# Altium schematic symbol library capstone.SchLib: 11 symbols
Pins are listed as number, name and electrical type; pins without a type are passive.

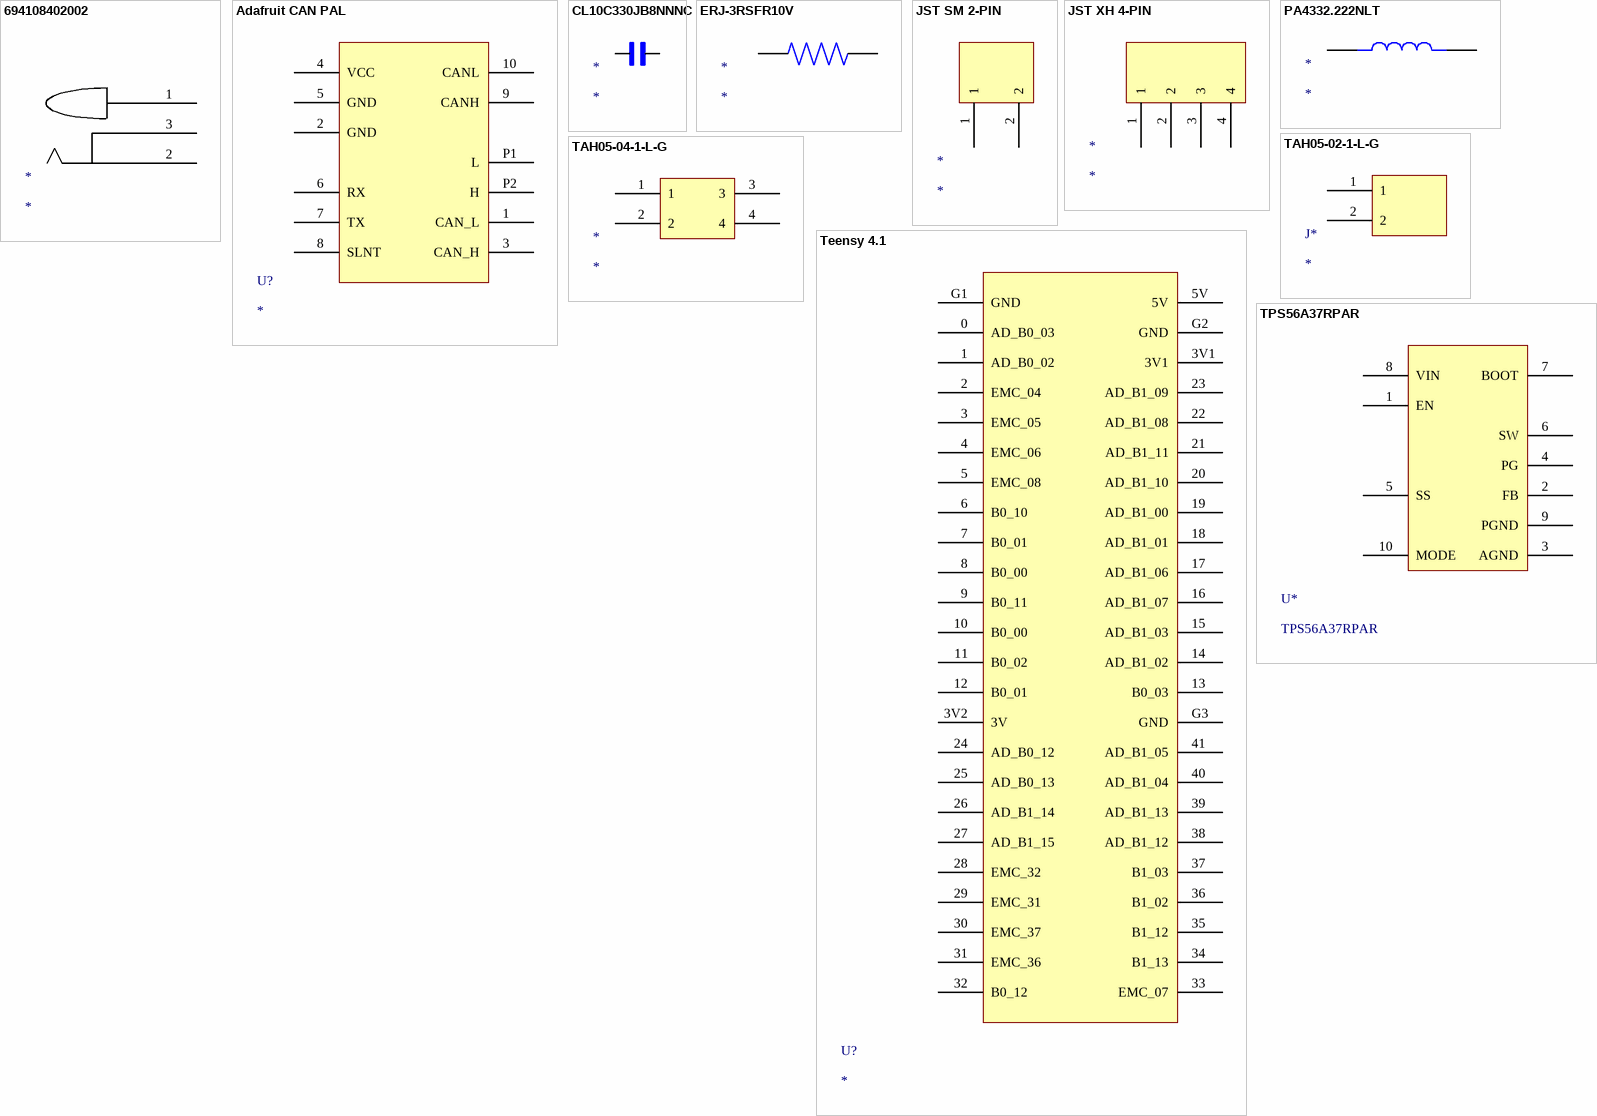
[diagram p0: symbols 694108402002 to TPS56A37RPAR]

## 694108402002
designator *
footprint 694108402002
pins: 1, 2, 3

## Adafruit CAN PAL
designator U?
CAN transciever
footprint ADAFRUIT CAN PAL
pins: 1 CAN_L, 2 GND, 3 CAN_H, 4 VCC, 5 GND, 6 RX, 7 TX, 8 SLNT, 9 CANH, 10 CANL, P1 L, P2 H

## CL10C330JB8NNNC
designator *
footprint CL10C330JB8NNNC
pins: 1, 2

## ERJ-3RSFR10V
designator *
footprint ERJ-3RSFR10V
pins: 1, 2

## JST SM 2-PIN
designator *
footprint JST SM 2-PIN
pins: 1, 2

## JST XH 4-PIN
designator *
footprint JST XH 4-PIN
pins: 1, 2, 3, 4

## PA4332.222NLT
designator *
footprint PA4332.222NLT
pins: 1, 2

## TAH05-02-1-L-G
designator J*
footprint TAH05-02-1-L-G
pins: 1, 2

## TAH05-04-1-L-G
designator *
footprint TAH05-04-1-L-G
pins: 1, 2, 3, 4

## Teensy 4.1
designator U?
Microcontroller
footprint Teensy 4.1
pins: 0 AD_B0_03, 1 AD_B0_02, 2 EMC_04, 3 EMC_05, 3V1, 3V2 3V, 4 EMC_06, 5 EMC_08, 5V, 6 B0_10, 7 B0_01, 8 B0_00, 9 B0_11, 10 B0_00, 11 B0_02, 12 B0_01, 13 B0_03, 14 AD_B1_02, 15 AD_B1_03, 16 AD_B1_07, 17 AD_B1_06, 18 AD_B1_01, 19 AD_B1_00, 20 AD_B1_10, 21 AD_B1_11, 22 AD_B1_08, 23 AD_B1_09, 24 AD_B0_12, 25 AD_B0_13, 26 AD_B1_14, 27 AD_B1_15, 28 EMC_32, 29 EMC_31, 30 EMC_37, 31 EMC_36, 32 B0_12, 33 EMC_07, 34 B1_13, 35 B1_12, 36 B1_02, 37 B1_03, 38 AD_B1_12, 39 AD_B1_13, 40 AD_B1_04, 41 AD_B1_05, G1 GND, G2 GND, G3 GND

## TPS56A37RPAR
designator U*
footprint TPS56A37RPAR
pins: 1 EN, 2 FB, 3 AGND, 4 PG, 5 SS, 6 SW, 7 BOOT, 8 VIN, 9 PGND, 10 MODE